# Altium footprint library WE-HCFT.PcbLib: 62 footprints (part 3 of 4)
Each footprint in its own frame and in the unit in brackets; x right, y up, seen from the top. Pads: shape width x height; smd on the part's side, far side on the other; paste and mask are expansions set on the pad; w line width, h text height; cw(c..) or ccw(c..) is an arc to the next point about the centre after c.
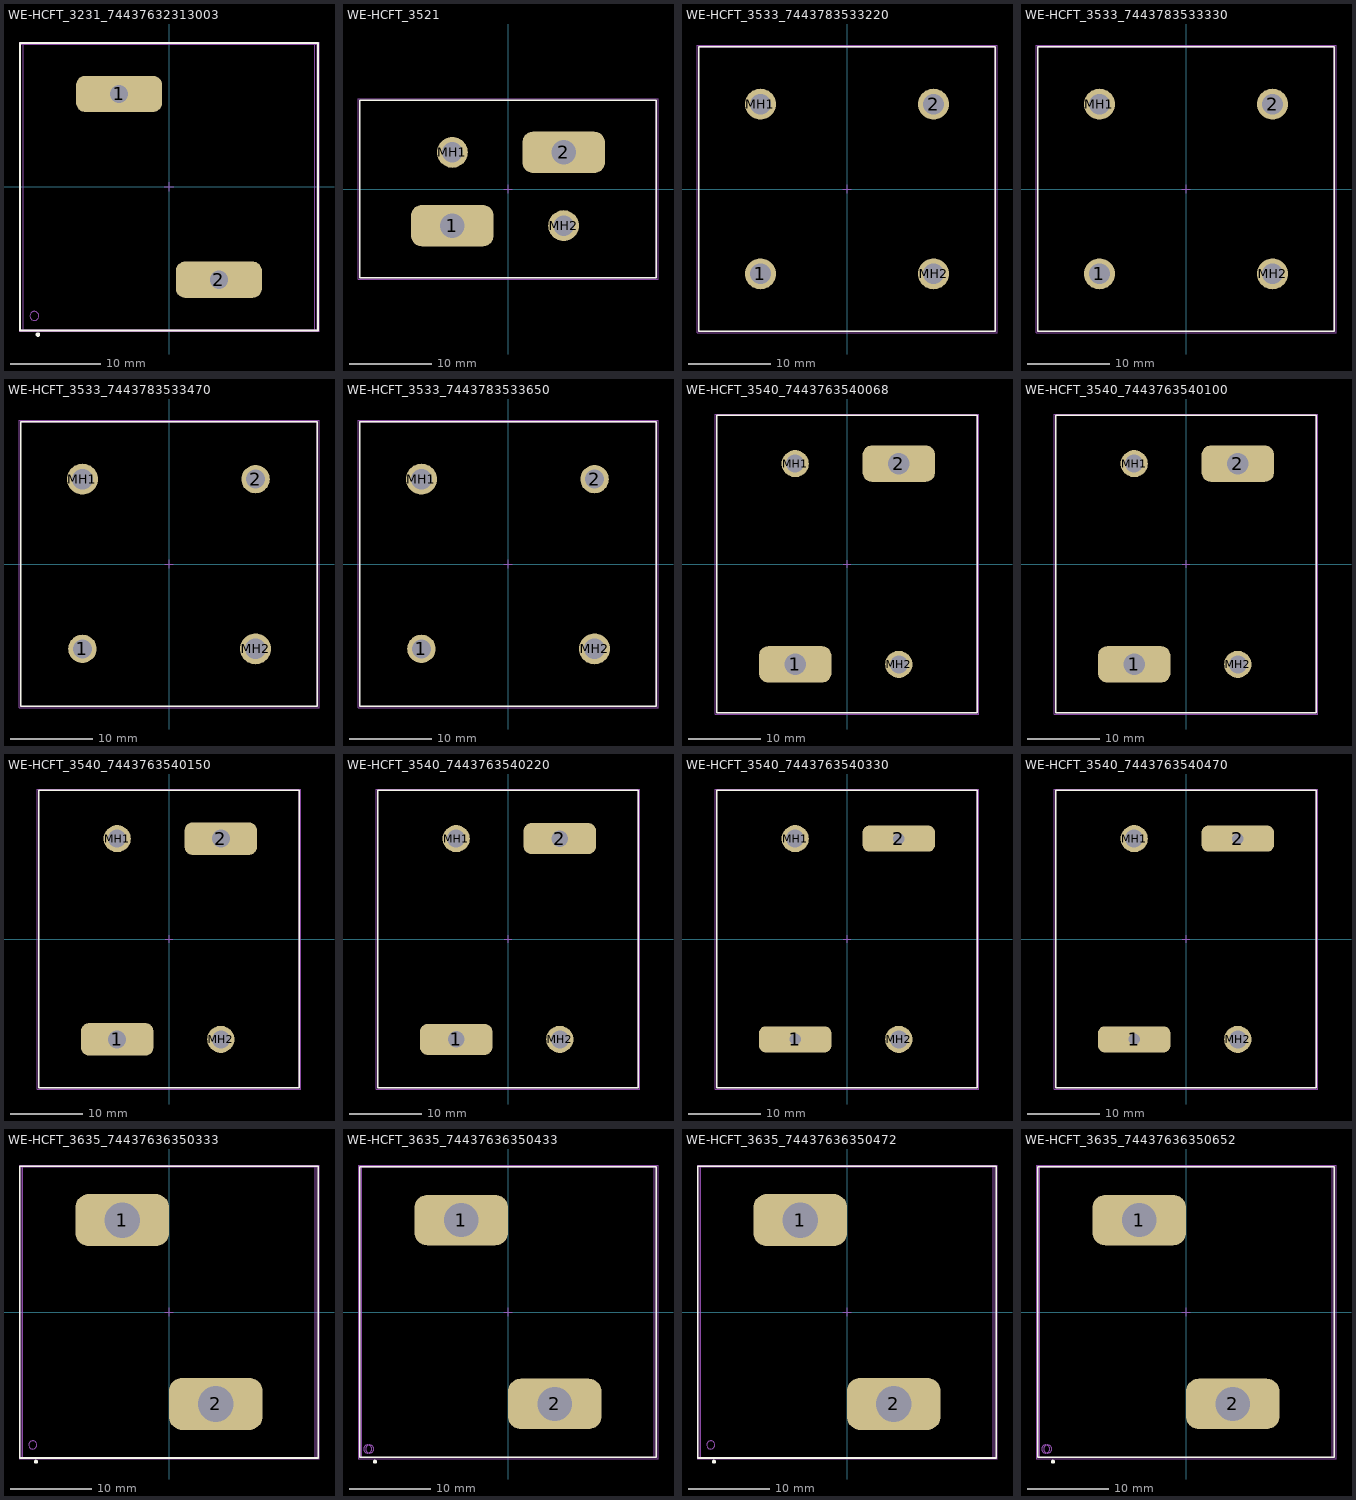
[diagram p2: the footprints below, top view; thin cyan lines are the x and y axes]

## WE-HCFT_3231_74437632313003 [mm] "THT High Current Inductor, body 32.00 x 32.00 mm"
height 30
pads (2):
  rrect50% 9.5x4 hole 2 square: 1(-5.5,10.25) 2(5.5,-10.25)
Top Overlay:
  circle w0.25: c-14.464,-16.313 r0.125
  lines w0.2: -16.45,-15.85 16.45,-15.85 16.45,15.85 -16.45,15.85 -16.45,-15.85
Top Assembly:
  circle w0.1: c-14.85,-14.25 r0.5
  lines w0.1: -16.35,-15.75 16.35,-15.75 16.35,15.75 -16.35,15.75 -16.35,-15.75
Top Designator:
  text ".Designator" at -3.647,-0.357 h1
Top 3D Body:
  lines w0.1: -16.1,-15.75 16.1,-15.75 16.1,15.75 -16.1,15.75 -16.1,-15.75
Top Courtyard:
  lines w0.05: -16.55,-15.95 -16.55,15.95 16.55,15.95 16.55,-15.95 -16.55,-15.95
Top Component Center:
  lines w0.1: -0.5,0 0.5,0 ; 0,-0.5 0,0.5
3D body "74437632313003.stp": height 29.55, standoff -3.95, extent -16.1,-15.5 16.1,15.5

## WE-HCFT_3521 [mm] "THT High Current Inductor, body 36x21.5mm"
height 35
pads (4):
  rrect50% 10x5 hole 3 square: 1(-6.75,-4.45) 2(6.75,4.45)
  round 3.75 hole 2.5: MH1(-6.75,4.45) MH2(6.75,-4.45)
Top Overlay:
  lines w0.2: -18,-10.75 -18,10.75 18,10.75 18,-10.75 -18,-10.75
Top Assembly:
  lines w0.1: -18,-10.75 18,-10.75 18,10.75 -18,10.75 -18,-10.75
Top Designator:
  text ".Designator" at -3.647,-0.357 h1
Top 3D Body:
  lines w0.1: -18,-10.75 -18,10.75 18,10.75 18,-10.75 -18,-10.75
Top Courtyard:
  lines w0.05: -18.2,-10.95 -18.2,10.95 18.2,10.95 18.2,-10.95 -18.2,-10.95
Top Component Center:
  lines w0.1: -0.5,0 0.5,0 ; 0,-0.5 0,0.5
3D body "3521_7443763521xxx.stp": height 33.45, standoff -3.95, extent -17.6,-10.25 17.6,10.25

## WE-HCFT_3533_7443783533220 [mm] "THT High Current Inductor, body 36x34.5mm"
height 35
pads (4):
  round 3.75 hole 2.5: 1(-10.5,-10.3) 2(10.5,10.3) MH1(-10.5,10.3) MH2(10.5,-10.3)
Top Overlay:
  lines w0.2: -18,-17.25 -18,17.25 18,17.25 18,-17.25 -18,-17.25
Top Assembly:
  lines w0.1: -18,-17.25 18,-17.25 18,17.25 -18,17.25 -18,-17.25
Top Designator:
  text ".Designator" at -3.647,-0.357 h1
Top 3D Body:
  lines w0.1: -18,-17.25 -18,17.25 18,17.25 18,-17.25 -18,-17.25
Top Courtyard:
  lines w0.05: -18.2,-17.45 18.2,-17.45 18.2,17.45 -18.2,17.45 -18.2,-17.45
Top Component Center:
  lines w0.1: -0.5,0 0.5,0 ; 0,-0.5 0,0.5
3D body "3533_7443783533xxx_2,0 wire.stp": height 32.25, standoff -4.95, extent -17.6,-16.9 17.6,16.9

## WE-HCFT_3533_7443783533330 [mm] "THT High Current Inductor, body 36x34.5mm"
height 35
pads (4):
  round 3.75 hole 2.5: 1(-10.5,-10.3) 2(10.5,10.3) MH1(-10.5,10.3) MH2(10.5,-10.3)
Top Overlay:
  lines w0.2: -18,-17.25 -18,17.25 18,17.25 18,-17.25 -18,-17.25
Top Assembly:
  lines w0.1: -18,-17.25 18,-17.25 18,17.25 -18,17.25 -18,-17.25
Top Designator:
  text ".Designator" at -3.647,-0.357 h1
Top 3D Body:
  lines w0.1: -18,-17.25 -18,17.25 18,17.25 18,-17.25 -18,-17.25
Top Courtyard:
  lines w0.05: -18.2,-17.45 18.2,-17.45 18.2,17.45 -18.2,17.45 -18.2,-17.45
Top Component Center:
  lines w0.1: -0.5,0 0.5,0 ; 0,-0.5 0,0.5
3D body "3533_7443783533xxx_2,0 wire.stp": height 32.25, standoff -4.95, extent -17.6,-16.9 17.6,16.9

## WE-HCFT_3533_7443783533470 [mm] "THT High Current Inductor, body 36x34.5mm"
height 35
pads (4):
  round 3.45 hole 2.3: 1(-10.5,-10.3) 2(10.5,10.3)
  round 3.75 hole 2.5: MH1(-10.5,10.3) MH2(10.5,-10.3)
Top Overlay:
  lines w0.2: -18,-17.25 -18,17.25 18,17.25 18,-17.25 -18,-17.25
Top Assembly:
  lines w0.1: -18,-17.25 18,-17.25 18,17.25 -18,17.25 -18,-17.25
Top Designator:
  text ".Designator" at -3.647,-0.357 h1
Top 3D Body:
  lines w0.1: -18,-17.25 -18,17.25 18,17.25 18,-17.25 -18,-17.25
Top Courtyard:
  lines w0.05: -18.2,-17.45 18.2,-17.45 18.2,17.45 -18.2,17.45 -18.2,-17.45
Top Component Center:
  lines w0.1: -0.5,0 0.5,0 ; 0,-0.5 0,0.5
3D body "3533_7443783533xxx_1,8 wire.stp": height 32.25, standoff -4.95, extent -17.6,-16.9 17.6,16.9

## WE-HCFT_3533_7443783533650 [mm] "THT High Current Inductor, body 36x34.5mm"
height 35
pads (4):
  round 3.45 hole 2.3: 1(-10.5,-10.3) 2(10.5,10.3)
  round 3.75 hole 2.5: MH1(-10.5,10.3) MH2(10.5,-10.3)
Top Overlay:
  lines w0.2: -18,-17.25 18,-17.25 18,17.25 -18,17.25 -18,-17.25
Top Assembly:
  lines w0.1: -18,-17.25 -18,17.25 18,17.25 18,-17.25 -18,-17.25
Top Designator:
  text ".Designator" at -3.647,-0.357 h1
Top 3D Body:
  lines w0.1: -18,-17.25 18,-17.25 18,17.25 -18,17.25 -18,-17.25
Top Courtyard:
  lines w0.05: -18.2,-17.45 -18.2,17.45 18.2,17.45 18.2,-17.45 -18.2,-17.45
Top Component Center:
  lines w0.1: -0.5,0 0.5,0 ; 0,-0.5 0,0.5
3D body "3533_7443783533xxx_1,8 wire.stp": height 32.25, standoff -4.95, extent -17.6,-16.9 17.6,16.9

## WE-HCFT_3540_7443763540068 [mm] "THT High Current Inductor, body 36x41mm"
height 35
pads (4):
  rrect50% 10x5 hole 3 square: 1(-7.15,-13.85) 2(7.15,13.85)
  round 3.75 hole 2.5: MH1(-7.15,13.85) MH2(7.15,-13.85)
Top Overlay:
  lines w0.2: -18,-20.5 18,-20.5 18,20.5 -18,20.5 -18,-20.5
Top Assembly:
  lines w0.1: -18,-20.5 -18,20.5 18,20.5 18,-20.5 -18,-20.5
Top Designator:
  text ".Designator" at -3.647,-0.357 h1
Top 3D Body:
  lines w0.1: -18,-20.5 18,-20.5 18,20.5 -18,20.5 -18,-20.5
Top Courtyard:
  lines w0.05: -18.2,-20.7 -18.2,20.7 18.2,20.7 18.2,-2.5 18.2,-20.7 -18.2,-20.7
Top Component Center:
  lines w0.1: -0.5,0 0.5,0 ; 0,-0.5 0,0.5
3D body "3540_7443763540xxx_2,0 wire.stp": height 33.45, standoff -3.45, extent -17.6,-20.26 17.6,20.25

## WE-HCFT_3540_7443763540100 [mm] "THT High Current Inductor, body 36x41mm"
height 35
pads (4):
  rrect50% 10x5 hole 3 square: 1(-7.15,-13.85) 2(7.15,13.85)
  round 3.75 hole 2.5: MH1(-7.15,13.85) MH2(7.15,-13.85)
Top Overlay:
  lines w0.2: -18,-20.5 -18,20.5 18,20.5 18,-20.5 -18,-20.5
Top Assembly:
  lines w0.1: -18,-20.5 18,-20.5 18,20.5 -18,20.5 -18,-20.5
Top Designator:
  text ".Designator" at -3.647,-0.357 h1
Top 3D Body:
  lines w0.1: -18,-20.5 -18,20.5 18,20.5 18,-20.5 -18,-20.5
Top Courtyard:
  lines w0.05: -18.2,-20.7 18.2,-20.7 18.2,-2.5 18.2,20.7 -18.2,20.7 -18.2,-20.7
Top Component Center:
  lines w0.1: -0.5,0 0.5,0 ; 0,-0.5 0,0.5
3D body "3540_7443763540xxx_2,0 wire.stp": height 33.45, standoff -3.45, extent -17.6,-20.26 17.6,20.25

## WE-HCFT_3540_7443763540150 [mm] "THT High Current Inductor, body 36x41mm"
height 35
pads (4):
  rrect50% 10x4.5 hole 2.5 square: 1(-7.15,-13.85) 2(7.15,13.85)
  round 3.75 hole 2.5: MH1(-7.15,13.85) MH2(7.15,-13.85)
Top Overlay:
  lines w0.2: -18,-20.5 18,-20.5 18,20.5 -18,20.5 -18,-20.5
Top Assembly:
  lines w0.1: -18,-20.5 -18,20.5 18,20.5 18,-20.5 -18,-20.5
Top Designator:
  text ".Designator" at -3.647,-0.357 h1
Top 3D Body:
  lines w0.1: -18,-20.5 -18,20.5 18,20.5 18,-20.5 -18,-20.5
Top Courtyard:
  lines w0.05: -18.2,-20.7 -18.2,20.7 18.2,20.7 18.2,-2.5 18.2,-20.7 -18.2,-20.7
Top Component Center:
  lines w0.1: -0.5,0 0.5,0 ; 0,-0.5 0,0.5
3D body "3540_7443763540xxx_1,5 wire.stp": height 33.45, standoff -3.45, extent -17.6,-20.26 17.6,20.25

## WE-HCFT_3540_7443763540220 [mm] "THT High Current Inductor, body 36x41mm"
height 35
pads (4):
  rrect50% 10x4.3 hole 2.3 square: 1(-7.15,-13.85) 2(7.15,13.85)
  round 3.75 hole 2.5: MH1(-7.15,13.85) MH2(7.15,-13.85)
Top Overlay:
  lines w0.2: -18,-20.5 18,-20.5 18,20.5 -18,20.5 -18,-20.5
Top Assembly:
  lines w0.1: -18,-20.5 18,-20.5 18,20.5 -18,20.5 -18,-20.5
Top Designator:
  text ".Designator" at -3.647,-0.357 h1
Top 3D Body:
  lines w0.1: -18,-20.5 -18,20.5 18,20.5 18,-20.5 -18,-20.5
Top Courtyard:
  lines w0.05: -18.2,-20.7 -18.2,20.7 18.2,20.7 18.2,-2.5 18.2,-20.7 -18.2,-20.7
Top Component Center:
  lines w0.1: -0.5,0 0.5,0 ; 0,-0.5 0,0.5
3D body "3540_7443763540xxx_1,3 wire.stp": height 33.45, standoff -3.45, extent -17.6,-20.26 17.6,20.25

## WE-HCFT_3540_7443763540330 [mm] "THT High Current Inductor, body 36x41mm"
height 35
pads (4):
  rrect50% 10x3.6 hole 1.6 square: 1(-7.15,-13.85) 2(7.15,13.85)
  round 3.75 hole 2.5: MH1(-7.15,13.85) MH2(7.15,-13.85)
Top Overlay:
  lines w0.2: -18,-20.5 18,-20.5 18,20.5 -18,20.5 -18,-20.5
Top Assembly:
  lines w0.1: -18,-20.5 18,-20.5 18,20.5 -18,20.5 -18,-20.5
Top Designator:
  text ".Designator" at -3.647,-0.357 h1
Top 3D Body:
  lines w0.1: -18,-20.5 -18,20.5 18,20.5 18,-20.5 -18,-20.5
Top Courtyard:
  lines w0.05: -18.2,-20.7 -18.2,20.7 18.2,20.7 18.2,-2.5 18.2,-20.7 -18.2,-20.7
Top Component Center:
  lines w0.1: -0.5,0 0.5,0 ; 0,-0.5 0,0.5
3D body "3540_7443763540xxx_0,8 wire.stp": height 33.45, standoff -3.45, extent -17.6,-20.26 17.6,20.25

## WE-HCFT_3540_7443763540470 [mm] "THT High Current Inductor, body 36x41mm"
height 35
pads (4):
  rrect50% 10x3.6 hole 1.6 square: 1(-7.15,-13.85) 2(7.15,13.85)
  round 3.75 hole 2.5: MH1(-7.15,13.85) MH2(7.15,-13.85)
Top Overlay:
  lines w0.2: -18,-20.5 -18,20.5 18,20.5 18,-20.5 -18,-20.5
Top Assembly:
  lines w0.1: -18,-20.5 -18,20.5 18,20.5 18,-20.5 -18,-20.5
Top Designator:
  text ".Designator" at -3.647,-0.357 h1
Top 3D Body:
  lines w0.1: -18,-20.5 18,-20.5 18,20.5 -18,20.5 -18,-20.5
Top Courtyard:
  lines w0.05: -18.2,-20.7 18.2,-20.7 18.2,-2.5 18.2,20.7 -18.2,20.7 -18.2,-20.7
Top Component Center:
  lines w0.1: -0.5,0 0.5,0 ; 0,-0.5 0,0.5
3D body "3540_7443763540xxx_0,8 wire.stp": height 33.45, standoff -3.45, extent -17.6,-20.26 17.6,20.25

## WE-HCFT_3635_74437636350333 [mm] "THT High Current Inductor, body 36.00 x 35.70 mm"
height 34.2
pads (2):
  rrect50% 11.5x6.4 hole 4.4 square: 1(-5.75,11.3) 2(5.75,-11.3)
Top Overlay:
  circle w0.25: c-16.364,-18.413 r0.125
  lines w0.2: -18.35,-17.95 18.35,-17.95 18.35,17.95 -18.35,17.95 -18.35,-17.95
Top Assembly:
  circle w0.1: c-16.75,-16.35 r0.5
  lines w0.1: -18.25,-17.85 18.25,-17.85 18.25,17.85 -18.25,17.85 -18.25,-17.85
Top Designator:
  text ".Designator" at -3.647,-0.357 h1
Top 3D Body:
  lines w0.1: -18,-17.85 -18,17.85 18,17.85 18,-17.85 -18,-17.85
Top Courtyard:
  lines w0.05: -18.45,-18.05 -18.45,18.05 18.45,18.05 18.45,-18.05 -18.45,-18.05
Top Component Center:
  lines w0.1: -0.5,0 0.5,0 ; 0,-0.5 0,0.5
3D body "74437636350333.stp": height 33.25, standoff -3.95, extent -18,-17.6 18,17.6

## WE-HCFT_3635_74437636350433 [mm] "THT High Current Inductor, body 36.00 x 35.70 mm"
height 34.2
pads (2):
  rrect50% 11.5x6.2 hole 4.2 square: 1(-5.75,11.3) 2(5.75,-11.3)
Top Overlay:
  circle w0.25: c-16.364,-18.413 r0.125
  lines w0.2: -18.25,-17.85 -18.25,17.85 18.25,17.85 18.25,-17.85 -18.25,-17.85
Top Assembly:
  circle w0.1: c-17.25,-16.85 r0.5
  lines w0.1: -18.25,-17.85 -18.25,17.85 18.25,17.85 18.25,-17.85 -18.25,-17.85
Top Designator:
  text ".Designator" at -3.647,-0.357 h1
Top 3D Body:
  circle w0.1: c-17,-16.85 r0.5
  lines w0.1: -18,-17.85 18,-17.85 18,17.85 -18,17.85 -18,-17.85
Top Courtyard:
  lines w0.05: -18.45,-18.05 18.45,-18.05 18.45,18.05 -18.45,18.05 -18.45,-18.05
Top Component Center:
  lines w0.1: -0.5,0 0.5,0 ; 0,-0.5 0,0.5
3D body "74437636350433.stp": height 33.25, standoff -3.95, extent -18,-17.6 18,17.6

## WE-HCFT_3635_74437636350472 [mm] "THT High Current Inductor, body 36.00 x 35.70 mm"
height 34.2
pads (2):
  rrect50% 11.5x6.4 hole 4.4 square: 1(-5.75,11.3) 2(5.75,-11.3)
Top Overlay:
  circle w0.25: c-16.364,-18.413 r0.125
  lines w0.2: -18.35,-17.95 18.35,-17.95 18.35,17.95 -18.35,17.95 -18.35,-17.95
Top Assembly:
  circle w0.1: c-16.75,-16.35 r0.5
  lines w0.1: -18.25,-17.85 18.25,-17.85 18.25,17.85 -18.25,17.85 -18.25,-17.85
Top Designator:
  text ".Designator" at -3.647,-0.357 h1
Top 3D Body:
  lines w0.1: -18,-17.85 18,-17.85 18,17.85 -18,17.85 -18,-17.85
Top Courtyard:
  lines w0.05: -18.45,-18.05 -18.45,18.05 18.45,18.05 18.45,-18.05 -18.45,-18.05
Top Component Center:
  lines w0.1: -0.5,0 0.5,0 ; 0,-0.5 0,0.5
3D body "74437636350472.stp": height 33.25, standoff -3.95, extent -18,-17.6 18,17.6

## WE-HCFT_3635_74437636350652 [mm] "THT High Current Inductor, body 36.00 x 35.70 mm"
height 34.2
pads (2):
  rrect50% 11.5x6.2 hole 4.2 square: 1(-5.75,11.3) 2(5.75,-11.3)
Top Overlay:
  circle w0.25: c-16.364,-18.413 r0.125
  lines w0.2: -18.25,-17.85 -18.25,17.85 18.25,17.85 18.25,-17.85 -18.25,-17.85
Top Assembly:
  circle w0.1: c-17.25,-16.85 r0.5
  lines w0.1: -18.25,-17.85 -18.25,17.85 18.25,17.85 18.25,-17.85 -18.25,-17.85
Top Designator:
  text ".Designator" at -3.647,-0.357 h1
Top 3D Body:
  circle w0.1: c-17,-16.85 r0.5
  lines w0.1: -18,-17.85 18,-17.85 18,17.85 -18,17.85 -18,-17.85
Top Courtyard:
  lines w0.05: -18.45,-18.05 18.45,-18.05 18.45,18.05 -18.45,18.05 -18.45,-18.05
Top Component Center:
  lines w0.1: -0.5,0 0.5,0 ; 0,-0.5 0,0.5
3D body "74437636350652.stp": height 33.25, standoff -3.95, extent -18,-17.6 18,17.6